# Altium footprint library Trimmer_Common.PcbLib: 1 footprints
Each footprint in its own frame and in the unit in brackets; x right, y up, seen from the top. Pads: shape width x height; smd on the part's side, far side on the other; paste and mask are expansions set on the pad; w line width, h text height; cw(c..) or ccw(c..) is an arc to the next point about the centre after c.
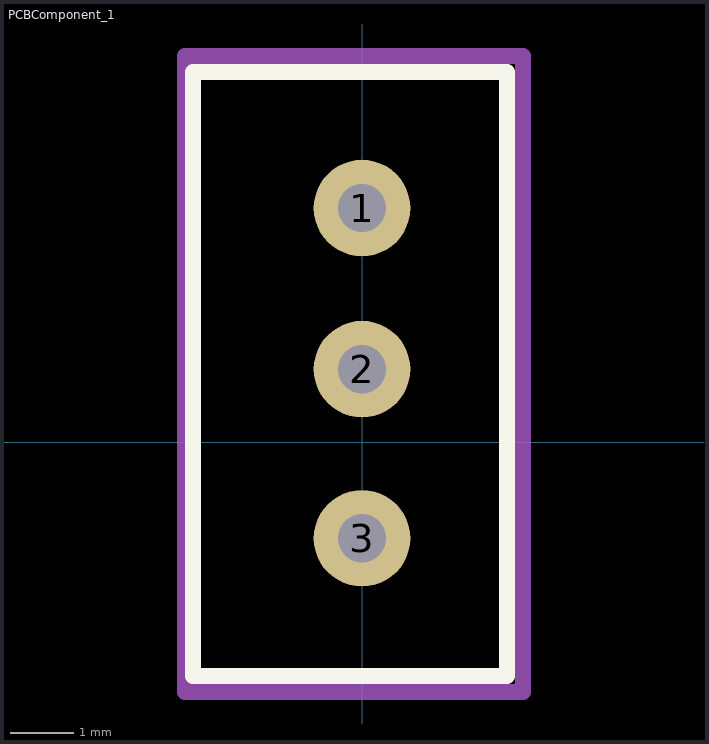
[diagram p0: the footprint, top view; thin cyan lines are the x and y axes]

## PCBComponent_1 [mil]
pads (3):
  round 60 hole 30: 1(0,145.5) 2(0,45.5) 3(0,-59.5)
Top Overlay:
  lines w10: -105,-145 90,-145 90,230 -105,230 -105,-145
Mechanical 1:
  lines w10: -110,-155 100,-155 100,240 -110,240 -110,-155
3D body "User Library-3296_Bourns.step": height 440.26, standoff -314.46, extent -97.95,-144.5 92.21,230.7